# Altium footprint library Module.PcbLib: 88 footprints (part 3 of 6)
Each footprint in its own frame and in the unit in brackets; x right, y up, seen from the top. Pads: shape width x height; smd on the part's side, far side on the other; paste and mask are expansions set on the pad; w line width, h text height; cw(c..) or ccw(c..) is an arc to the next point about the centre after c.
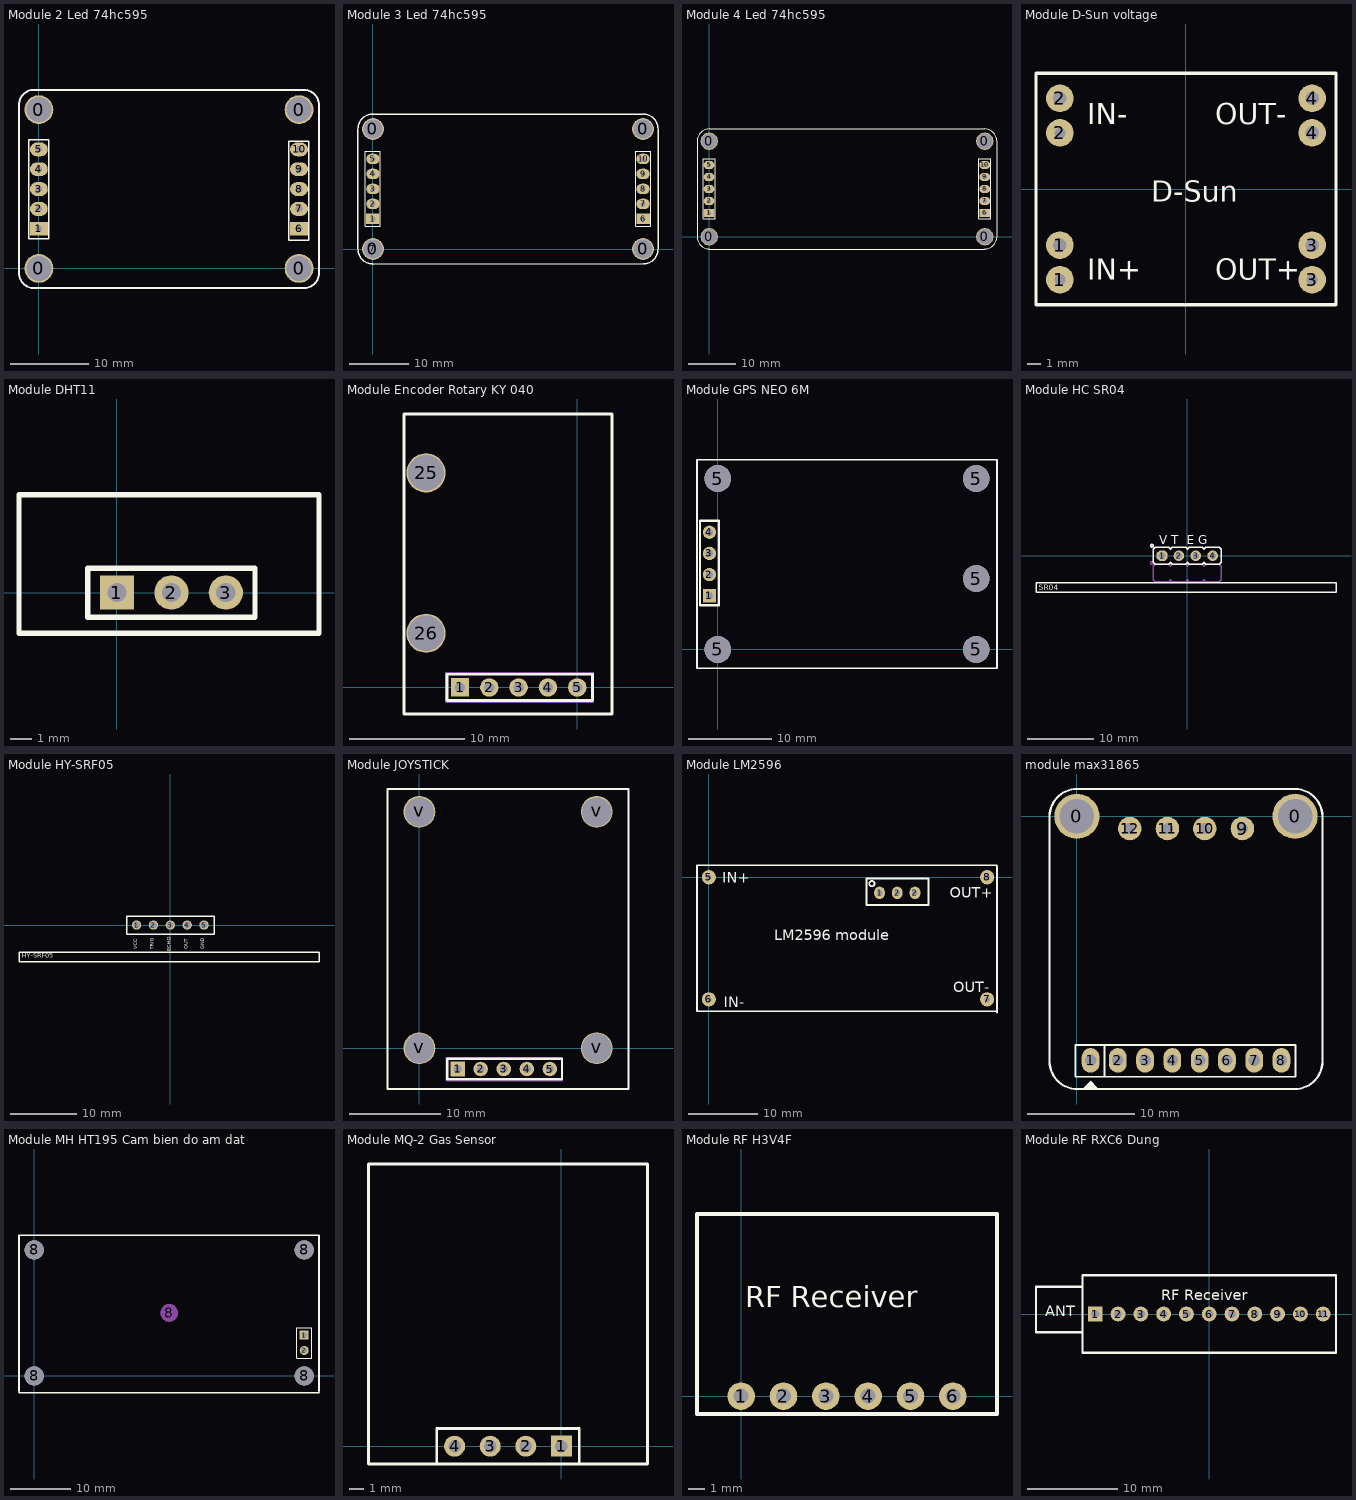
[diagram p2: the footprints below, top view; thin cyan lines are the x and y axes]

## Module 2 Led 74hc595 [mil]
height 300
pads (14):
  round 145.67 hole 125.98: 0(0,0) 0(0,800) 0(1311.81,0) 0(1311.81,800)
  rect 90x70 hole 34: 1(0,200) 6(1311.81,200)
  oval 90x70 hole 34: 2(0,300) 3(0,400) 4(0,500) 5(0,600) 7(1311.81,300) 8(1311.81,400) 9(1311.81,500) 10(1311.81,600)
Top Overlay:
  lines w7.87: -50.16,149.09 -50.16,649.09 49.84,649.09 49.84,149.09 -50.16,149.09 ; 1260.59,141.18 1360.59,141.18 1360.59,641.18 1260.59,641.18 1260.59,141.18
  lines w10: -100,-21.61 -100,824.34 ; -99.98,822.5 cw(c-23.96,824.34) -21.98,900.36 ; -99.4,-21.61 ccw(c-23.39,-23.58) -21.33,-99.6 ; -23.96,900 1334.34,900 ; -21.33,-100 1334.05,-100 ; 1334.05,-99.52 ccw(c1336.02,-23.5) 1412.04,-21.66 ; 1334.34,899.92 cw(c1336.18,823.9) 1412.2,821.92 ; 1411.81,-21.66 1411.81,821.92
Top Designator:
  text ".Designator" at 510.01,386.64 h60
3D body "7seg 0.56 2led.step": height 709.95, standoff 237.51, extent -99.67,-98.81 1412.38,901.54
3D body "61300511821.stp": height 335.04, standoff -121.65, extent -49.21,140.16 49.22,659.85
3D body "61300511821.stp": height 335.04, standoff -121.65, extent 1262.6,140.16 1361.03,659.85
3D body "Screw-3mmX10mm.step": height 461.79, standoff 0, extent -98.42,701.58 98.43,898.43
3D body "Screw-3mmX10mm.step": height 461.79, standoff 0, extent -98.42,-98.42 98.43,98.43
3D body "Screw-3mmX10mm.step": height 461.79, standoff 0, extent 1213.39,701.58 1410.24,898.43
3D body "Screw-3mmX10mm.step": height 461.79, standoff 0, extent 1213.39,-98.42 1410.24,98.43

## Module 3 Led 74hc595 [mil]
pads (15):
  round 145.67 hole 125.98: 0(0,0) 0(0,800) 0(1800,0) 0(1800,800)
  rect 90x70 hole 34: 1(0,200) 6(1800,200)
  oval 90x70 hole 34: 2(0,300) 3(0,400) 4(0,500) 5(0,600) 7(1800,300) 8(1800,400) 9(1800,500) 10(1800,600)
  round 78.74 on Top Overlay: 7(0,0)
Top Overlay:
  lines w7.87: -50,150 -50,650 50,650 50,150 -50,150 ; 1750,150 1850,150 1850,650 1750,650 1750,150
  lines w10: -100,0 ccw(c0,0) 0,-100 1800,-100 ccw(c1800,0) 1900,0 1900,800 ccw(c1800,800) 1800,900 0,900 ccw(c0,800) -100,800 -100,0
Top Designator:
  text ".Designator" at 753.9,386.45 h60
3D body "Screw-3mmX10mm.step": height 461.79, standoff 0, extent -98.42,701.58 98.43,898.43
3D body "Screw-3mmX10mm.step": height 461.79, standoff 0, extent -98.42,-98.42 98.43,98.43
3D body "Screw-3mmX10mm.step": height 461.79, standoff 0, extent 1701.58,701.58 1898.43,898.43
3D body "Screw-3mmX10mm.step": height 461.79, standoff 0, extent 1701.58,-98.42 1898.43,98.43
3D body "module 3led.step": height 708.66, standoff 101.91, extent -99.99,-99.99 1900.01,900.01
3D body "61300511821.stp": height 335.04, standoff -121.65, extent -49.21,140.16 49.21,659.85
3D body "61300511821.stp": height 335.04, standoff -121.65, extent 1750.79,140.16 1849.21,659.85

## Module 4 Led 74hc595 [mm]
pads (14):
  round 3.7 hole 3.2: 0(0,0) 0(0,20.22) 0(58.32,0) 0(58.32,20.22)
  rect 2.286x1.778 hole 0.864: 1(-0.05,5.03) 6(58.32,5.03)
  oval 2.286x1.778 hole 0.864: 2(-0.05,7.57) 3(-0.05,10.11) 4(-0.05,12.65) 5(-0.05,15.19) 7(58.32,7.57) 8(58.32,10.11) 9(58.32,12.65) 10(58.32,15.19)
Top Overlay:
  lines w0.2: -1.32,3.76 -1.32,16.46 1.22,16.46 1.22,3.76 -1.32,3.76 ; 57.05,3.76 57.05,16.46 59.59,16.46 59.59,3.76 57.05,3.76
  lines w0.254: -2.59,0 ccw(c0,0) 0,-2.59 58.32,-2.59 ccw(c58.32,0) 60.91,0 60.91,20.22 ccw(c58.32,20.22) 58.32,22.81 0,22.81 ccw(c0,20.22) -2.59,20.22 -2.59,0
Top Designator:
  text ".Designator" at 25.449,9.766 h1.52
3D body "Screw-3mmX10mm.step": height 11.73, standoff 0, extent 55.82,-2.5 60.82,2.5
3D body "Screw-3mmX10mm.step": height 11.73, standoff 0, extent 55.82,17.72 60.82,22.72
3D body "Screw-3mmX10mm.step": height 11.73, standoff 0, extent -2.5,-2.5 2.5,2.5
3D body "Screw-3mmX10mm.step": height 11.73, standoff 0, extent -2.5,17.72 2.5,22.72
3D body "module 4led.step": height 18, standoff 2.59, extent -2.59,-2.59 60.91,22.81
3D body "61300511821.stp": height 8.51, standoff -3.09, extent -1.3,3.51 1.2,16.71
3D body "61300511821.stp": height 8.51, standoff -3.09, extent 57.07,3.51 59.57,16.71

## Module D-Sun voltage [mil]
pads (8):
  round 80 hole 32: 1(-365,-262.5) 2(-365,162.5) 3(365,-262.5)
  round 80 hole 39.37: 1(-365,-162.5) 2(-365,262.5) 3(365,-162.5) 4(365,162.5) 4(365,262.5)
Top Overlay:
  lines w10: -433.9,-335.33 -433.9,335.33 431.14,335.33 ; -432.09,-335.33 434.05,-335.33 434.06,335.33
  text "IN-" at -285,187.5 h60
  text "IN+" at -285,-262.5 h60
  text "OUT+" at 85,-262.5 h60
  text "OUT-" at 85,187.5 h60
  text "D-Sun" at -100,-37.5 h60
Top Designator:
  text ".Designator" at -145.53,-13.55 h60
3D body: height 157.48, standoff -157.48, extent 349.54,-178.62 381.03,-147.12
3D body: height 157.48, standoff -157.48, extent 349.54,-278.62 381.03,-247.12
3D body: height 59.06, standoff 0, extent 315,-212.5 415,-112.5
3D body: height 59.06, standoff 0, extent 315,-312.5 415,-212.5
3D body: height 157.48, standoff -157.48, extent 349.54,246.38 381.03,277.88
3D body: height 157.48, standoff -157.48, extent 349.54,146.38 381.03,177.88
3D body: height 59.06, standoff 0, extent 315,212.5 415,312.5
3D body: height 59.06, standoff 0, extent 315,112.5 415,212.5
3D body: height 157.48, standoff -157.48, extent -380.46,246.38 -348.97,277.88
3D body: height 157.48, standoff -157.48, extent -380.46,146.38 -348.97,177.88
3D body: height 59.06, standoff 0, extent -415,212.5 -315,312.5
3D body: height 59.06, standoff 0, extent -415,112.5 -315,212.5
3D body: height 157.48, standoff -157.48, extent -380.46,-178.62 -348.97,-147.12
3D body: height 157.48, standoff -157.48, extent -380.46,-278.62 -348.97,-247.12
3D body: height 59.06, standoff 0, extent -415,-212.5 -315,-112.5
3D body: height 59.06, standoff 0, extent -415,-312.5 -315,-212.5
3D body "D-SUN_dcdc_step_down_Simple_NoSilk_.step": height 200.79, standoff 39.37, extent -430.04,-333.21 440.04,328.21

## Module DHT11 [mm]
pads (3):
  rect 1.6x1.6 hole 0.9: 1(0,0)
  round 1.6 hole 0.9: 2(2.54,0) 3(5.08,0)
Top Overlay:
  lines w0.254: -4.572,-1.905 9.428,-1.905 9.428,4.572 -4.572,4.572 -4.572,-1.905 ; -1.36,-1.143 6.44,-1.143 6.44,1.143 -1.36,1.143 -1.36,-1.143
Top Designator:
  text ".Designator" at -1.283,0.989 h1.52
3D body "Header-F-2.54X3.stp": height 8.6, standoff -3.1, extent -1.395,-1.26 6.475,1.24
3D body "DHT11 module.STEP": height 36.7, standoff 1.65, extent -4.572,-1.853 9.428,4.647

## Module Encoder Rotary KY 040 [mm]
pads (7):
  rect 1.6x1.6 hole 0.9: 1(-10.16,0)
  round 1.6 hole 0.9: 2(-7.62,0) 3(-5.08,0) 4(-2.54,0) 5(0,0)
  round 3.4 hole 3.1: 25(-13.1,18.6) 26(-13.1,4.7)
Top Overlay:
  lines w0.254: -15,-2.3 3,-2.3 3,23.7 -15,23.7 -15,-2.3 ; -11.303,-1.143 -11.303,1.143 1.34,1.143 1.34,-1.143 -11.303,-1.143
Top Designator:
  text ".Designator" at -10.517,7.95 h1.52
Mechanical 15:
  lines w0.1: -11.38,-1.3 -11.38,1.3 1.42,1.3 1.42,-1.3 -11.38,-1.3
3D body "rotary encoder_chesr_2013.stp": height 31.32, standoff 1.25, extent -16.739,-7.239 2.591,23.038
3D body "HEADER 2.54X5.stp": height 5.6, standoff -5.6, extent -11.303,-1.235 1.397,1.263
3D body "Screw-3mmX10mm.step": height 5.23, standoff -6.5, extent -15.6,16.1 -10.6,21.1
3D body "Screw-3mmX10mm.step": height 5.23, standoff -6.5, extent -15.6,2.2 -10.6,7.2

## Module GPS NEO 6M [mm]
pads (9):
  rect 1.6x1.6 hole 0.9: 1(-1,6.44)
  round 1.6 hole 0.9: 2(-1,8.98) 3(-1,11.52) 4(-1,14.06)
  round 3.2 hole 3.2: 5(0,0) 5(0,20.5) 5(31,0) 5(31,8.5) 5(31,20.5)
Top Overlay:
  lines w0.2: -2.5,-2.25 33.5,-2.25 33.5,22.75 -2.5,22.75 -2.5,-2.25
  lines w0.254: -2.143,5.297 -2.143,15.44 0.143,15.44 0.143,5.297 -2.143,5.297
Top Designator:
  text ".Designator" at 11.789,9.906 h1.52
3D body "Screw-3mmX10mm.step": height 13.23, standoff 1.5, extent 28.5,-2.5 33.5,2.5
3D body "Screw-3mmX10mm.step": height 13.23, standoff 1.5, extent 28.5,18 33.5,23
3D body "Screw-3mmX10mm.step": height 13.23, standoff 1.5, extent -2.5,-2.5 2.5,2.5
3D body "Screw-3mmX10mm.step": height 13.23, standoff 1.5, extent -2.5,18 2.5,23
3D body "HEADER 2.54X4.stp": height 13, standoff 1.8, extent -2.263,5.297 0.235,15.457
3D body "Header-F-2.54X4.stp": height 8.6, standoff -3.1, extent -2.25,5.045 0.25,15.455
3D body "User Library-UBLOX_GPS_NEO-6M.STEP": height 14.24, standoff 11.6, extent 9.314,1.987 21.674,18.587
3D body: height 11.6, standoff 10, extent -2.54,-2.286 33.528,22.86

## Module HC SR04 [mm] "Ultrasonic sensor Module, HC-SR04"
pads (4):
  oct 1.6x1.6 / inner oct 1.6x1.6 / far side oct 1.6x2.2 hole 1 mask+0.1: 1(-3.81,0)
  round 1.6 / inner round 1.6 / far side oval 1.6x2.2 hole 1 mask+0.1: 2(-1.27,0) 3(1.27,0) 4(3.81,0)
Top Overlay:
  circle w0.2: c-5.33,1.5 r0.2
  lines w0.2: -2.57,-1 -2.27,-1.3 -0.27,-1.3 0.03,-1 ; -2.57,1 -2.27,1.3 -0.27,1.3 0.03,1 ; -2.51,-1 -2.81,-1.3 -4.81,-1.3 -5.11,-1 -5.11,1 -4.81,1.3 -2.81,1.3 -2.51,1 ; -0.03,-1 0.27,-1.3 2.27,-1.3 2.57,-1 ; -0.03,1 0.27,1.3 2.27,1.3 2.57,1 ; 2.51,-1 2.81,-1.3 4.81,-1.3 ; 2.51,1 2.81,1.3 4.81,1.3 ; 4.81,-1.3 5.11,-1 ; 4.81,-1.3 5.11,-1 ; 4.81,1.3 5.11,1 ; 4.81,1.3 5.11,1 ; 5.11,-1 5.11,1 ; -22.8,-5.5 22.4,-5.5 22.4,-4.1 -22.8,-4.1 -22.8,-5.5
  text "V T  E G" at -4.23,1.7 h1.3
  text "SR04" at -22.4,-5.2 h0.8
Top Designator:
  text ".Designator" at -3.911,-7.644 h1.52
Mechanical 15:
  circle w0.2: c-5.33,-1.1 r0.2
  lines w0.2: -2.57,-3.6 -2.27,-3.9 -0.27,-3.9 0.03,-3.6 ; -2.57,-1.6 -2.27,-1.3 -0.27,-1.3 0.03,-1.6 ; -2.51,-3.6 -2.81,-3.9 -4.81,-3.9 -5.11,-3.6 -5.11,-1.6 -4.81,-1.3 -2.81,-1.3 -2.51,-1.6 ; -0.03,-3.6 0.27,-3.9 2.27,-3.9 2.57,-3.6 ; -0.03,-1.6 0.27,-1.3 2.27,-1.3 2.57,-1.6 ; 2.51,-3.6 2.81,-3.9 4.81,-3.9 ; 2.51,-1.6 2.81,-1.3 4.81,-1.3 ; 4.81,-3.9 5.11,-3.6 ; 4.81,-3.9 5.11,-3.6 ; 4.81,-1.3 5.11,-1.6 ; 4.81,-1.3 5.11,-1.6 ; 5.11,-3.6 5.11,-1.6
3D body "HC-SR04_User Library.STEP": height 20.6, standoff -4.58, extent -22.7,-17.8 22.3,0.268

## Module HY-SRF05 [mm] "Ultrasonic sensor Module"
pads (5):
  round 1.4 / inner round 1.4 / far side oval 1.4x2.2 hole 1 mask+0.1: 1(-5.08,0) 2(-2.54,0) 3(0,0) 4(2.54,0) 5(5.08,0)
Top Overlay:
  lines w0.2: -22.8,-5.5 -22.8,-4.1 22.4,-4.1 22.4,-5.5 -22.8,-5.5 ; -6.6,-1.4 -6.6,1.3 6.6,1.3 6.6,-1.4 -6.6,-1.4
  text "GND" at 5.368,-3.651 h0.9
  text "OUT" at 2.828,-3.62 h0.9
  text "ECHO" at 0.288,-3.913 h0.9
  text "TRIG" at -2.252,-3.724 h0.9
  text "VCC" at -4.792,-3.625 h0.9
  text "HY-SRF05" at -22.4,-5.2 h1.2
Top Designator:
  text ".Designator" at -3.911,-7.644 h1.52
3D body "HY-SRF05.SLDPRT": height 28.85, standoff 2.01, extent -22.85,-17.499 22.45,-0.033
3D body "female_header_a-bl254-eg-g05d.stp": height 8.5, standoff -3.2, extent -6.475,-1.25 6.475,1.25

## Module JOYSTICK [mm]
pads (9):
  rect 1.6x1.6 hole 0.9: 1(4.191,-2.286)
  round 1.6 hole 0.9: 2(6.731,-2.286) 3(9.271,-2.286) 4(11.811,-2.286) 5(14.351,-2.286)
  round 3.5 hole 3.2: v(0,0) v(0,26) v(19.5,0) v(19.5,26)
Top Overlay:
  lines w0.254: -3.509,-4.486 22.991,-4.486 22.991,28.514 -3.509,28.514 -3.509,-4.486 ; 3.048,-3.429 15.691,-3.429 15.691,-1.143 3.048,-1.143 3.048,-3.429
Top Designator:
  text ".Designator" at 5.245,9.816 h1.52
Mechanical 15:
  lines w0.1: 2.971,-3.586 15.771,-3.586 15.771,-0.986 2.971,-0.986 2.971,-3.586
3D body "Screw-3mmX10mm.step": height 5.23, standoff -6.5, extent -2.5,-2.5 2.5,2.5
3D body "Screw-3mmX10mm.step": height 5.23, standoff -6.5, extent 17,-2.5 22,2.5
3D body "Screw-3mmX10mm.step": height 5.23, standoff -6.5, extent 17,23.5 22,28.5
3D body "Screw-3mmX10mm.step": height 5.23, standoff -6.5, extent -2.5,23.5 2.5,28.5
3D body "HEADER 2.54X5.stp": height 5.6, standoff -5.6, extent 3.048,-3.521 15.748,-1.023
3D body "joy_stick_2a.step": height 34.2, standoff 0.6, extent -5.192,-9.728 22.388,30.047

## Module LM2596 [mil]
pads (7):
  oval 60x70 hole 31: 1(963,-88.06) 2(1063,-88.06) 2(1163,-88.06)
  round 80 hole 32: 5(0,0) 6(0,-688.98) 7(1570,-688.98) 8(1570,0)
Top Overlay:
  circle w10: c920,-36.06 r15
  lines w10: 1625.82,-765 1625.82,61.77 ; 1625.82,-756.87 -67.09,-756.87 -67.09,67.89 1625.82,67.89 ; 889,-157.06 1239,-157.06 1239,-7.06 889,-7.06 889,-157.06
  text "LM2596 module" at 370,-355 h60
  text "IN+" at 75,-30 h60
  text "IN-" at 85,-735 h60
  text "OUT+" at 1360,-115 h60
  text "OUT-" at 1380,-650 h60
Top Designator:
  text ".Designator" at 635.35,-362.1 h60
3D body "LM2596 DC-DC StepDown Converter v1.step": height 521.55, standoff -35.54, extent -57.92,-757.88 1635,68.89

## module max31865 [mil]
pads (14):
  round 165.35 hole 125.98: 0(0,0) 0(800,0)
  oval 65x90 hole 42: 1(50,-895) 2(150,-895) 3(250,-895) 4(350,-895) 5(450,-895) 6(550,-895) 7(650,-895) 8(750,-895)
  round 86 hole 39.37: 9(606.93,-45) 10(469.13,-45) 11(331.93,-45) 12(194.13,-45)
Top Overlay:
  region: 50,-970 25,-995 75,-995
  lines w7: 101,-955 101,-839 ; -6,-955 -6,-838 802,-838 802,-955 -6,-955
  lines w7.87: -100,-900 ccw(c0,-900) 0,-1000 800,-1000 ccw(c800,-900) 900,-900 900,0 ccw(c800,0) 800,100 0,100 ccw(c0,0) -100,0 -100,-900
Top Designator:
  text ".Designator" at 253.9,-463.55 h60
Mechanical 12:
  text "MAX31865" at 160,-523.14 h118.11
3D body "MAX31865.STEP": height 470.38, standoff -68.77, extent -100,-1000.87 900,100.87

## Module MH HT195 Cam bien do am dat [mm]
pads (7):
  rect 1.5x1.5 hole 0.9: 1(45,6.79)
  round 1.5 hole 0.9: 2(45,4.25)
  round 3.2 hole 3.2: 8(0,0) 8(0,21) 8(45,0) 8(45,21)
  round 3 on Mech15: 8(22.5,10.5)
Top Overlay:
  lines w0.2: 43.73,2.98 46.27,2.98 46.27,8.06 43.73,8.06 43.73,2.98
  lines w0.254: -2.54,-2.819 47.46,-2.819 ; -2.54,-2.54 -2.54,23.46 47.46,23.46 47.46,-2.54
Top Designator:
  text ".Designator" at 18.597,9.976 h1.52
3D body "3362P.STEP": height 5.99, standoff -1.4, extent 29.187,8.41 35.787,15.01
3D body "User Library-LED-D3G.STEP": height 6.2, standoff -4.9, extent 36.619,18.752 40.275,22.752
3D body "User Library-Terminal-Screw-3A-3way.STEP": height 11.6, standoff -1.4, extent -2.972,3.005 4.628,18.605
3D body: height 1.6, standoff 0, extent -2.565,-2.565 47.473,23.495
3D body "User Library-SONGLE Relay SRU-12VDC-SL-C.STEP": height 15.3, standoff -5, extent 5.957,3.02 25.057,18.52
3D body "User Library-LED-D3R.STEP": height 6.2, standoff -4.9, extent 36.452,-2 40.108,2
3D body "HEADER 2.54X2.stp": height 9.8, standoff -1.4, extent 43.73,3.107 46.229,8.187
3D body "Screw-3mmX10mm.step": height 3.73, standoff -8, extent -2.5,18.5 2.5,23.5
3D body "Screw-3mmX10mm.step": height 3.73, standoff -8, extent 42.5,18.5 47.5,23.5
3D body "Screw-3mmX10mm.step": height 3.73, standoff -8, extent 42.5,-2.5 47.5,2.5
3D body "Screw-3mmX10mm.step": height 3.73, standoff -8, extent -2.5,-2.5 2.5,2.5

## Module MQ-2 Gas Sensor [mm]
pads (4):
  rect 1.5x1.5 hole 0.9: 1(0,0)
  round 1.5 hole 0.9: 2(-2.54,0) 3(-5.08,0) 4(-7.62,0)
Top Overlay:
  lines w0.2: -13.76,-1.27 -13.76,20.13 6.14,20.13 6.14,-1.27 -13.76,-1.27 ; -8.89,-1.27 -8.89,1.27 1.27,1.27 1.27,-1.27 -8.89,-1.27
Top Designator:
  text ".Designator" at -7.521,9.086 h1.52
3D body "MQ2 Gas Sensor.SLDPRT": height 33, standoff -3.25, extent -13.86,-1.27 6.24,20.23

## Module RF H3V4F [mm] "H3V4F 433M Receiver 18x12x2mm"
pads (6):
  round 1.66 hole 0.9: 1(0,0) 2(2.54,0) 3(5.08,0) 4(7.62,0) 5(10.16,0) 6(12.7,0)
Top Overlay:
  lines w0.254: -2.65,-1.067 15.35,-1.067 15.35,10.933 -2.65,10.933 -2.65,-1.067
  text "RF Receiver" at 0.254,5.334 h1.27
Top Designator:
  text ".Designator" at 2.639,4.589 h1.52
Multi-Layer:
  pour cut-out: -2.65,10.933 15.35,10.933 15.35,1 -2.65,1
3D body "MODUN RF H5V4F_jumper19mm.step": height 5.39, standoff -13.61, extent -2.65,-1.09 15.35,10.956

## Module RF RXC6 Dung [mm] "RXC6 433M Receiver"
pads (11):
  rect 1.66x1.66 hole 0.9: 1(-12.7,0)
  round 1.66 hole 0.9: 2(-10.16,0) 3(-7.62,0) 4(-5.08,0) 5(-2.54,0) 6(0,0) 7(2.54,0) 8(5.08,0) 9(7.62,0) 10(10.16,0) 11(12.7,0)
Top Overlay:
  lines w0.254: -14.127,-2.032 -19.304,-2.032 -19.304,3.048 -14.127,3.048 ; -14.127,-4.318 14.127,-4.318 14.127,4.318 -14.127,4.318 -14.127,-4.318
  text "RF Receiver" at -5.334,1.12 h2
  text "ANT" at -18.288,-0.641 h2
Top Designator:
  text ".Designator" at -6.299,-0.344 h1.52
Mechanical 15:
  lines w0.2: -0.508,0 0.508,0 ; 0,-0.508 0,0.508
3D body "pin_header_aw140-ea-g06g.stp": height 5.43, standoff -5.71, extent -13.87,-1.25 1.17,3.65
3D body "pin_header_aw140-ea-g06g.stp": height 5.43, standoff -5.71, extent -1.17,-1.25 13.87,3.65
3D body "Module RXC6 RF433.step": height 15.6, standoff 3.6, extent -14,-3.82 14,3.78
3D body "SPRING, RF ANTENA.STEP": height 19.3, standoff -6.6, extent -19.264,-1.992 -14.264,3.008